# Altium footprint library ICM-42688-P.PcbLib: 1 footprints
Each footprint in its own frame and in the unit in brackets; x right, y up, seen from the top. Pads: shape width x height; smd on the part's side, far side on the other; paste and mask are expansions set on the pad; w line width, h text height; cw(c..) or ccw(c..) is an arc to the next point about the centre after c.
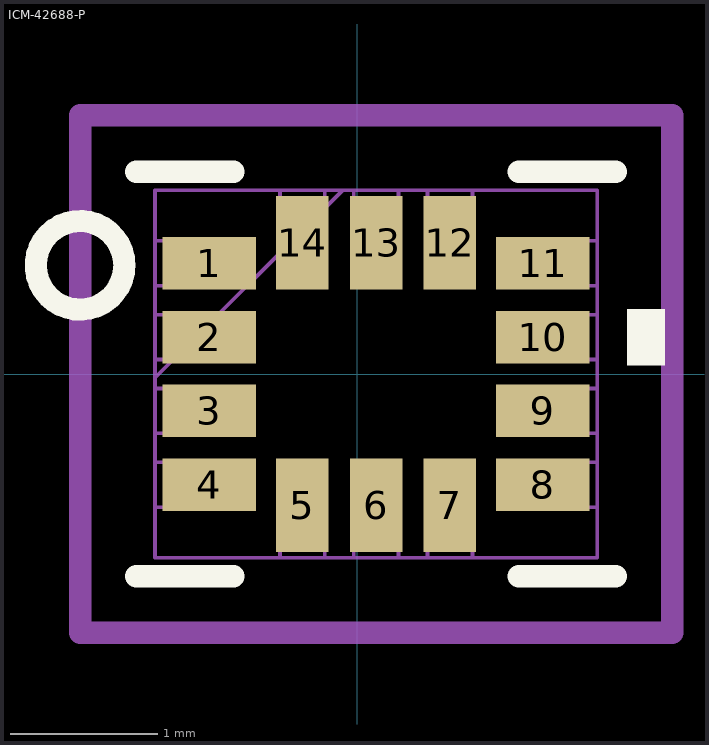
[diagram p0: the footprint, top view; thin cyan lines are the x and y axes]

## ICM-42688-P [mil]
pads (14):
  rect 25x14 smd paste+0 mask+0: 1(-39.5,29.53) 2(-39.5,9.84) 3(-39.5,-9.84) 4(-39.5,-29.53) 8(49.5,-29.53) 9(49.5,-9.84) 10(49.5,9.84) 11(49.5,29.53)
  rect 14x25 smd paste+0 mask+0: 5(-14.69,-35) 6(5,-35) 7(24.68,-35) 12(24.68,35) 13(5,35) 14(-14.69,35)
Top Overlay:
  circle w5.91: c-74,29 r11.81
  region: 72,17.34 82,17.34 82,2.34 72,2.34
  lines w6: -59,-54 -33.06,-54 ; -59,54 -33.06,54 ; 43.06,-54 69,-54 ; 43.06,54 69,54
Mechanical 13:
  lines w1: -54,-1 -4,49 ; -54,-49 64,-49 64,49 -54,49 -54,-49 ; -54,-35.53 -54,-23.53 -50,-23.53 -50,-35.53 -54,-35.53 ; -54,-15.84 -54,-3.84 -50,-3.84 -50,-15.84 -54,-15.84 ; -54,3.84 -54,15.84 -50,15.84 -50,3.84 -54,3.84 ; -54,23.53 -54,35.53 -50,35.53 -50,23.53 -54,23.53 ; -20.68,-49 -8.69,-49 -8.69,-45.5 -20.68,-45.5 -20.68,-49 ; -20.68,45.5 -8.69,45.5 -8.69,49 -20.68,49 -20.68,45.5 ; -1,-49 11,-49 11,-45.5 -1,-45.5 -1,-49 ; -1,45.5 11,45.5 11,49 -1,49 -1,45.5 ; 18.68,-49 30.68,-49 30.68,-45.5 18.68,-45.5 18.68,-49 ; 18.68,45.5 30.68,45.5 30.68,49 18.68,49 18.68,45.5 ; 60,-35.53 64,-35.53 64,-23.53 60,-23.53 60,-35.53 ; 60,-15.84 64,-15.84 64,-3.84 60,-3.84 60,-15.84 ; 60,3.84 64,3.84 64,15.84 60,15.84 60,3.84 ; 60,23.53 64,23.53 64,35.53 60,35.53 60,23.53
Mechanical 15:
  lines w6: -74,-69 -74,-56.53 -74,56.53 -74,69 -41.69,69 51.69,69 84,69 84,56.53 84,-56.53 84,-69 51.69,-69 -41.69,-69 -74,-69
3D body "LGA14_2P5X3X0P91_TDK.step": height 38.11, standoff 0, extent -54.02,-49.02 64.02,49.02